# Altium footprint library Connectors.PcbLib: 304 footprints (part 10 of 19)
Each footprint in its own frame and in the unit in brackets; x right, y up, seen from the top. Pads: shape width x height; smd on the part's side, far side on the other; paste and mask are expansions set on the pad; w line width, h text height; cw(c..) or ccw(c..) is an arc to the next point about the centre after c.
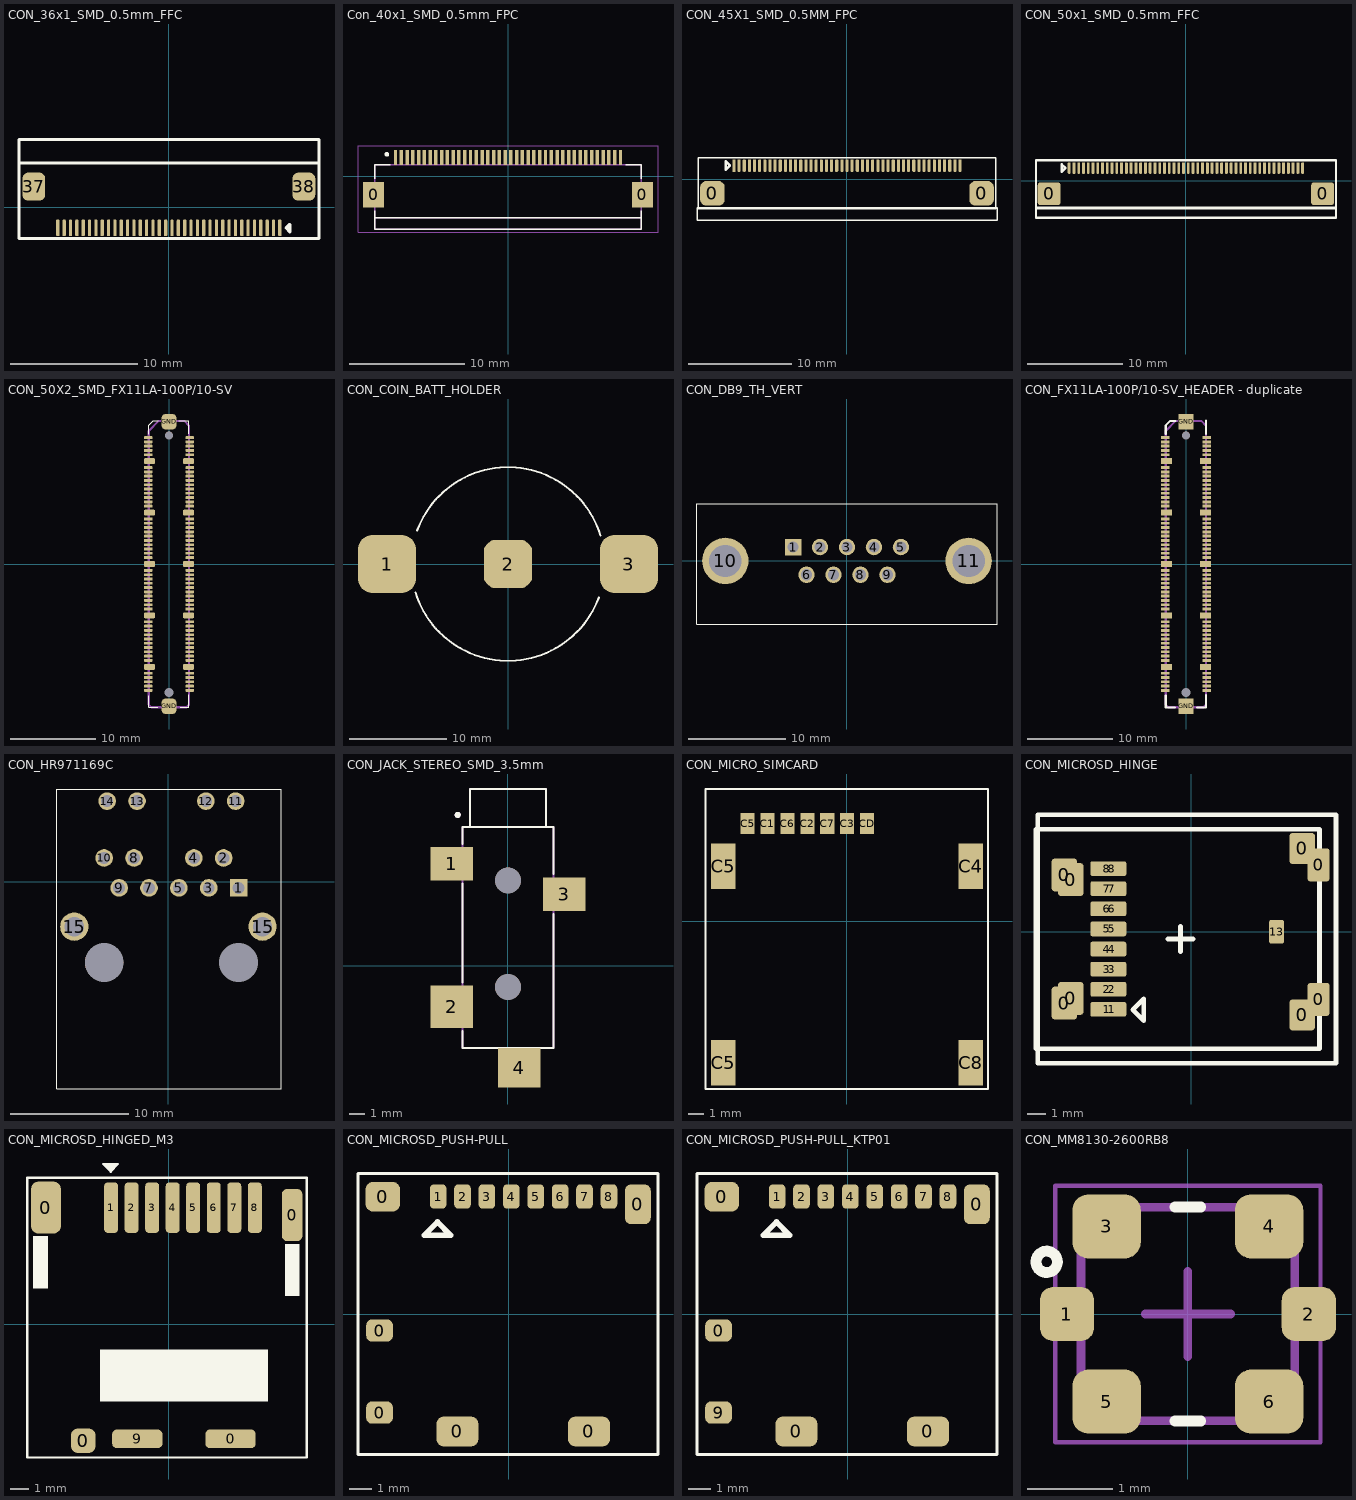
[diagram p9: the footprints below, top view; thin cyan lines are the x and y axes]

## CON_36x1_SMD_0.5mm_FFC [mil] "/ 20220629/ F-A.Ospina"
height 78.74
pads (38):
  rrect50% 10x51 smd: 1(344.49,-64) 2(324.8,-64) 3(305.12,-64) 4(285.43,-64) 5(265.75,-64) 6(246.06,-64) 7(226.38,-64) 8(206.69,-64) 9(187.01,-64) 10(167.32,-64) 11(147.64,-64) 12(127.95,-64) 13(108.27,-64) 14(88.58,-64) 15(68.9,-64) 16(49.21,-64) 17(29.53,-64) 18(9.84,-64) 19(-9.84,-64) 20(-29.53,-64) 21(-49.21,-64) 22(-68.9,-64) 23(-88.58,-64) 24(-108.27,-64) 25(-127.95,-64) 26(-147.64,-64) 27(-167.32,-64) 28(-187.01,-64) 29(-206.69,-64) 30(-226.38,-64) 31(-246.06,-64) 32(-265.75,-64) 33(-285.43,-64) 34(-305.12,-64) 35(-324.8,-64)
  rrect50% 10x50.98 smd: 36(-344.49,-64)
  rrect50% 71x87 smd: 37(-419,64) 38(419,64)
Top Overlay:
  lines w10: -464.93,137.06 -227.36,137.06 ; -230.52,137.06 234.24,137.01 466.03,137.01 ; -464.93,-96.88 465.77,-96.88 465.77,210.2 -464.93,210.2 -464.93,-96.88 ; 363.62,-64.13 375.43,-53.46 375.43,-76.45 363.62,-64.13
3D body "FH12A-36S-0.5SH.stp": height 79.53, standoff -5.42, extent -443.4,-76.47 442.46,199.12

## Con_40x1_SMD_0.5mm_FPC [mm] "/20230904/J-E.Pachon"
pads (42):
  rect 1.8x2.2 smd: 0(-11.65,-1.625) 0(11.65,-1.625)
  rect 0.3x1.3 smd: 1(-9.75,1.625) 2(-9.25,1.625) 3(-8.75,1.625) 4(-8.25,1.625) 5(-7.75,1.625) 6(-7.25,1.625) 7(-6.75,1.625) 8(-6.25,1.625) 9(-5.75,1.625) 10(-5.25,1.625) 11(-4.75,1.625) 12(-4.25,1.625) 13(-3.75,1.625) 14(-3.25,1.625) 15(-2.75,1.625) 16(-2.25,1.625) 17(-1.75,1.625) 18(-1.25,1.625) 19(-0.75,1.625) 20(-0.25,1.625) 21(0.25,1.625) 22(0.75,1.625) 23(1.25,1.625) 24(1.75,1.625) 25(2.25,1.625) 26(2.75,1.625) 27(3.25,1.625) 28(3.75,1.625) 29(4.25,1.625) 30(4.75,1.625) 31(5.25,1.625) 32(5.75,1.625) 33(6.25,1.625) 34(6.75,1.625) 35(7.25,1.625) 36(7.75,1.625) 37(8.25,1.625) 38(8.75,1.625) 39(9.25,1.625) 40(9.75,1.625)
Top Overlay:
  circle w0.2: c-10.5,1.875 r0.1
  lines w0.127: -11.55,-3.025 -11.55,-3.625 ; -11.55,-0.225 -11.55,0.975 -10.2,0.975 ; 10.2,0.975 11.55,0.975 11.55,-0.225 ; 11.55,-3.025 11.55,-3.625 ; -11.55,-3.625 -11.55,-4.625 11.55,-4.625 11.55,-3.625 ; -11.55,-3.625 11.55,-3.625
Top 3D Body (Mech13):
  lines w0.127: -11.55,-3.625 -11.55,-4.625 11.55,-4.625 11.55,-3.625 ; -11.55,-3.625 -11.55,0.975 11.55,0.975 11.55,-3.625 ; -11.55,-3.625 11.55,-3.625
Mechanical 15:
  lines w0.05: -13,-4.875 13,-4.875 13,2.625 -13,2.625 -13,-4.875
3D body "step_temp.STEP": height 2.2, standoff 0, extent -12.05,-4.625 12.05,1.775

## CON_45X1_SMD_0.5MM_FPC [mm] "/ 20200724 / N-A.Potosi"
pads (47):
  rrect50% 2.4x2.4 smd: 0(-13.1,-1.35) 0(13.1,-1.35)
  rect 0.3x1.2 smd: 1(-11,1.35)
  rrect50% 0.3x1.2 smd: 2(-10.5,1.35) 3(-10,1.35) 4(-9.5,1.35) 5(-9,1.35) 6(-8.5,1.35) 7(-8,1.35) 8(-7.5,1.35) 9(-7,1.35) 10(-6.5,1.35) 11(-6,1.35) 12(-5.5,1.35) 13(-5,1.35) 14(-4.5,1.35) 15(-4,1.35) 16(-3.5,1.35) 17(-3,1.35) 18(-2.5,1.35) 19(-2,1.35) 20(-1.5,1.35) 21(-1,1.35) 22(-0.5,1.35) 23(0,1.35) 24(0.5,1.35) 25(1,1.35) 26(1.5,1.35) 27(2,1.35) 28(2.5,1.35) 29(3,1.35) 30(3.5,1.35) 31(4,1.35) 32(4.5,1.35) 33(5,1.35) 34(5.5,1.35) 35(6,1.35) 36(6.5,1.35) 37(7,1.35) 38(7.5,1.35) 39(8,1.35) 40(8.5,1.35) 41(9,1.35) 42(9.5,1.35) 43(10,1.35) 44(10.5,1.35) 45(11,1.35)
Top Overlay:
  lines w0.127: -14.6,-3.95 -14.6,-2.75 14.6,-2.75 14.6,-3.95 -14.6,-3.95 ; -14.5,-2.84 -14.5,2.094 14.5,2.094 14.5,-2.84 -14.5,-2.84
  lines w0.254: -11.8,0.95 -11.4,1.35 -11.8,1.75 -11.8,0.95
3D body "s62684_451100alf.stp": height 2.11, standoff 0.05, extent -14,-3.97 14,1.67

## CON_50x1_SMD_0.5mm_FFC [mm] "/ 20200923 / V-A.Patino"
height 2
pads (52):
  rrect25% 2.4x2.4 smd: 0(-14.35,-1.35) 0(14.35,-1.35)
  rrect50% 0.3x1.2 smd mask+0.05: 1(-12.25,1.35) 2(-11.75,1.35) 3(-11.25,1.35) 4(-10.75,1.35) 5(-10.25,1.35) 6(-9.75,1.35) 7(-9.25,1.35) 8(-8.75,1.35) 9(-8.25,1.35) 10(-7.75,1.35) 11(-7.25,1.35) 12(-6.75,1.35) 13(-6.25,1.35) 14(-5.75,1.35) 15(-5.25,1.35) 16(-4.75,1.35) 17(-4.25,1.35) 18(-3.75,1.35) 19(-3.25,1.35) 20(-2.75,1.35) 21(-2.25,1.35) 22(-1.75,1.35) 23(-1.25,1.35) 24(-0.75,1.35) 25(-0.25,1.35) 26(0.25,1.35) 27(0.75,1.35) 28(1.25,1.35) 29(1.75,1.35) 30(2.25,1.35) 31(2.75,1.35) 32(3.25,1.35) 33(3.75,1.35) 34(4.25,1.35) 35(4.75,1.35) 36(5.25,1.35) 37(5.75,1.35) 38(6.25,1.35) 39(6.75,1.35) 40(7.25,1.35) 41(7.75,1.35) 42(8.25,1.35) 43(8.75,1.35) 44(9.25,1.35) 45(9.75,1.35) 46(10.25,1.35) 47(10.75,1.35) 48(11.25,1.35) 49(11.75,1.35) 50(12.25,1.35)
Top Overlay:
  lines w0.254: -15.73,-3.85 15.75,-3.85 15.75,-2.79 -15.73,-2.79 -15.73,-3.85 ; -15.73,-2.89 15.75,-2.89 15.75,2.15 -15.73,2.15 -15.73,-2.89 ; -13.05,0.95 -13.05,1.75 -12.65,1.35 -13.05,0.95
3D body "62684502100alf.stp": height 2, standoff -0.05, extent -15.24,-4.12 15.26,1.48

## CON_50X2_SMD_FX11LA-100P/10-SV [mm] "Hirose Conn/20200714/N-A.Potosi"
pads (114):
  rrect50% 1x0.33 smd: A1(-2.425,14.749) A2(-2.425,14.249) A3(-2.425,13.749) A4(-2.425,13.249) A5(-2.425,12.749) A6(-2.425,11.249) A7(-2.425,10.749) A8(-2.425,10.249) A9(-2.425,9.749) A10(-2.425,9.249) A11(-2.425,8.749) A12(-2.425,8.25) A13(-2.425,7.75) A14(-2.425,7.25) A15(-2.425,6.75) A16(-2.425,5.25) A17(-2.425,4.75) A18(-2.425,4.25) A19(-2.425,3.75) A20(-2.425,3.25) A21(-2.425,2.75) A22(-2.425,2.251) A23(-2.425,1.751) A24(-2.425,1.251) A25(-2.425,0.751) A26(-2.425,-0.749) A27(-2.425,-1.249) A28(-2.425,-1.749) A29(-2.425,-2.249) A30(-2.425,-2.749) A31(-2.425,-3.249) A32(-2.425,-3.748) A33(-2.425,-4.248) A34(-2.425,-4.748) A35(-2.425,-5.248) A36(-2.425,-6.747) A37(-2.425,-7.247) A38(-2.425,-7.747) A39(-2.425,-8.247) A40(-2.425,-8.747) A41(-2.425,-9.247) A42(-2.425,-9.747) A43(-2.425,-10.247) A44(-2.425,-10.747) A45(-2.425,-11.247) A46(-2.425,-12.747) A47(-2.425,-13.247) A48(-2.425,-13.747) A49(-2.425,-14.247) A50(-2.425,-14.747) B1(2.425,14.749) B2(2.425,14.249) B3(2.425,13.749) B4(2.425,13.249) B5(2.425,12.749) B6(2.425,11.249) B7(2.425,10.749) B8(2.425,10.249) B9(2.425,9.749) B10(2.425,9.249) B11(2.425,8.749) B12(2.425,8.25) B13(2.425,7.75) B14(2.425,7.25) B15(2.425,6.75) B16(2.425,5.251) B17(2.425,4.751) B18(2.425,4.251) B19(2.425,3.751) B20(2.425,3.251) B21(2.425,2.751) B22(2.425,2.251) B23(2.425,1.751) B24(2.425,1.251) B25(2.425,0.751) B26(2.425,-0.748) B27(2.425,-1.248) B28(2.425,-1.748) B29(2.425,-2.248) B30(2.425,-2.748) B31(2.425,-3.248) B32(2.425,-3.748) B33(2.425,-4.248) B34(2.425,-4.748) B35(2.425,-5.248) B36(2.425,-6.747) B37(2.425,-7.247) B38(2.425,-7.747) B39(2.425,-8.247) B40(2.425,-8.747) B41(2.425,-9.247) B42(2.425,-9.747) B43(2.425,-10.247) B44(2.425,-10.747) B45(2.425,-11.247) B46(2.425,-12.747) B47(2.425,-13.247) B48(2.425,-13.747) B49(2.425,-14.247) B50(2.425,-14.747)
  rrect50% 1.3x0.7 smd: GND(-2.275,-11.997) GND(-2.275,-5.998) GND(-2.275,0.001) GND(-2.275,6) GND(-2.275,11.999) GND(2.275,-11.996) GND(2.275,-5.998) GND(2.275,0.001) GND(2.275,6) GND(2.275,11.999)
  rrect50% 1.7x1.8 smd: GND(0,-16.601) GND(0,16.601)
  round 0.9 hole 1 unplated: ""(0,-14.997)
  round 0.9 hole 0.95 unplated: ""(0,14.999)
Top Overlay:
  lines w0.127: -2.365,-15.35 -2.365,-16.734 -1.29,-16.734 ; -2.365,15.156 -2.365,16.17 -1.835,16.7 -1.245,16.7 ; 1.13,16.709 2.322,16.709 2.322,15.17 ; 1.301,-16.734 2.322,-16.734 2.322,-15.272
Mechanical 1:
  lines w0.251: -2.366,-16.408 -2.366,15.517 -1.183,16.7 1.782,16.7 2.318,16.164 2.318,-16.444 2.04,-16.722 -2.052,-16.722 -2.366,-16.408
3D body "47879.stp": height 1.65, standoff -0.58, extent -2.495,-17.295 2.755,17.305

## CON_COIN_BATT_HOLDER [mm] "/20201001/N-A.Potosi"
pads (3):
  rrect50% 6x6 smd: 1(-12.5,0) 3(12.5,0)
  rrect50% 5x5 smd: 2(0,0)
Top Overlay:
  lines w0.203: -9.565,-2.918 ccw(c0,0) 9.391,-3.437 ; -9.391,3.437 cw(c0,0) 9.565,2.918
3D body "CR2032_closed_battery_BH.step": height 3.97, standoff 0.11, extent -11.625,-10.257 11.625,9.743

## CON_DB9_TH_VERT [mm] "/20220603/F-A.Ospina"
pads (11):
  rect 1.69x1.69 hole 1.143: 1(-5.54,1.42)
  round 1.69 hole 1.143: 2(-2.77,1.42) 3(0,1.42) 4(2.77,1.42) 5(5.54,1.42) 6(-4.155,-1.42) 7(-1.385,-1.42) 8(1.385,-1.42) 9(4.155,-1.42)
  round 4.76 hole 3.302: 10(-12.495,0) 11(12.495,0)
Top Overlay:
  lines w0.127: -15.4,2.9 -15.4,5.867 15.403,5.867 15.403,2.875 15.403,-6.497 15.4,-6.5 -15.4,-6.5 -15.4,2.933
Bottom Overlay:
  text "6" at -3.9,-3.38 h0.76
  text "7" at -1.13,-3.38 h0.76
  text "8" at 1.64,-3.38 h0.76
  text "9" at 4.41,-3.38 h0.76
  text "4" at 3.075,2.702 h0.76
  text "3" at 0.217,2.702 h0.76
  text "2" at -2.658,2.702 h0.76
  text "1" at -5.483,2.702 h0.76
  text "5" at 5.768,2.702 h0.76
3D body "sd09s24a6gv00lf.stp": height 12.26, standoff -3.19, extent -15.554,-6.296 15.446,6.254

## CON_FX11LA-100P/10-SV_HEADER - duplicate [mm]
pads (114):
  rect 1x0.33 smd: A1(-2.425,14.749) A2(-2.425,14.249) A3(-2.425,13.749) A4(-2.425,13.249) A5(-2.425,12.749) A6(-2.425,11.249) A7(-2.425,10.749) A8(-2.425,10.249) A9(-2.425,9.749) A10(-2.425,9.249) A11(-2.425,8.749) A12(-2.425,8.25) A13(-2.425,7.75) A14(-2.425,7.25) A15(-2.425,6.75) A16(-2.425,5.25) A17(-2.425,4.75) A18(-2.425,4.25) A19(-2.425,3.75) A20(-2.425,3.25) A21(-2.425,2.75) A22(-2.425,2.251) A23(-2.425,1.751) A24(-2.425,1.251) A25(-2.425,0.751) A26(-2.425,-0.749) A27(-2.425,-1.249) A28(-2.425,-1.749) A29(-2.425,-2.249) A30(-2.425,-2.749) A31(-2.425,-3.249) A32(-2.425,-3.748) A33(-2.425,-4.248) A34(-2.425,-4.748) A35(-2.425,-5.248) A36(-2.425,-6.747) A37(-2.425,-7.247) A38(-2.425,-7.747) A39(-2.425,-8.247) A40(-2.425,-8.747) A41(-2.425,-9.247) A42(-2.425,-9.747) A43(-2.425,-10.247) A44(-2.425,-10.747) A45(-2.425,-11.247) A46(-2.425,-12.747) A47(-2.425,-13.247) A48(-2.425,-13.747) A49(-2.425,-14.247) A50(-2.425,-14.747) B1(2.425,14.749) B2(2.425,14.249) B3(2.425,13.749) B4(2.425,13.249) B5(2.425,12.749) B6(2.425,11.249) B7(2.425,10.749) B8(2.425,10.249) B9(2.425,9.749) B10(2.425,9.249) B11(2.425,8.749) B12(2.425,8.25) B13(2.425,7.75) B14(2.425,7.25) B15(2.425,6.75) B16(2.425,5.251) B17(2.425,4.751) B18(2.425,4.251) B19(2.425,3.751) B20(2.425,3.251) B21(2.425,2.751) B22(2.425,2.251) B23(2.425,1.751) B24(2.425,1.251) B25(2.425,0.751) B26(2.425,-0.748) B27(2.425,-1.248) B28(2.425,-1.748) B29(2.425,-2.248) B30(2.425,-2.748) B31(2.425,-3.248) B32(2.425,-3.748) B33(2.425,-4.248) B34(2.425,-4.748) B35(2.425,-5.248) B36(2.425,-6.747) B37(2.425,-7.247) B38(2.425,-7.747) B39(2.425,-8.247) B40(2.425,-8.747) B41(2.425,-9.247) B42(2.425,-9.747) B43(2.425,-10.247) B44(2.425,-10.747) B45(2.425,-11.247) B46(2.425,-12.747) B47(2.425,-13.247) B48(2.425,-13.747) B49(2.425,-14.247) B50(2.425,-14.747)
  rect 1.3x0.7 smd: GND(-2.275,-11.997) GND(-2.275,-5.998) GND(-2.275,0.001) GND(-2.275,6) GND(-2.275,11.999) GND(2.275,-11.996) GND(2.275,-5.998) GND(2.275,0.001) GND(2.275,6) GND(2.275,11.999)
  rect 1.7x1.8 smd: GND(0,-16.601) GND(0,16.601)
  round 0.9 hole 1 unplated: ""(0,-14.997)
  round 0.9 hole 0.95 unplated: ""(0,14.999)
Top Overlay:
  lines w0.251: -2.365,-15.35 -2.365,-16.734 -1.29,-16.734 ; -2.365,15.156 -2.365,16.17 -1.835,16.7 -1.245,16.7 ; 1.301,-16.734 2.322,-16.734 2.322,-15.272 ; 2.322,15.17 2.322,16.752
Mechanical 1:
  lines w0.251: -2.366,-16.408 -2.366,15.517 -1.183,16.7 1.782,16.7 2.318,16.164 2.318,-16.444 2.04,-16.722 -2.052,-16.722 -2.366,-16.408
3D body "47879.stp": height 1.65, standoff -0.58, extent -2.495,-17.295 2.755,17.305

## CON_HR971169C [mm] "20220607 / E.Naranjo"
pads (17):
  rect 1.5x1.5 hole 1.016: 1(5.97,-0.51)
  round 1.5 hole 1.016: 2(4.7,2.03) 3(3.43,-0.51) 4(2.16,2.03) 5(0.89,-0.51) 7(-1.65,-0.51) 8(-2.92,2.03) 9(-4.19,-0.51) 10(-5.46,2.03) 11(5.72,6.86) 12(3.18,6.86) 13(-2.667,6.86) 14(-5.21,6.86)
  round 2.4 hole 1.651: 15(-8,-3.81) 15(8,-3.81)
  round 3.25 hole 3.302 unplated: ""(-5.46,-6.86) ""(5.97,-6.86)
Top Overlay:
  lines w0.1: -9.5,-17.61 -9.5,7.89 9.6,7.89 9.6,-17.61 -9.5,-17.61
3D body: height 15.21, standoff 0, extent -8.92,-17.61 8.86,7.84

## CON_JACK_STEREO_SMD_3.5mm [mm] "/ 20200727/ M-C.Calderon"
pads (6):
  rect 2.8x2.2 smd: 1(-3.7,6.7) 3(3.7,4.7)
  rect 2.8x2.8 smd: 2(-3.7,-2.7)
  rect 2.8x2.6 smd: 4(0.75,-6.7)
  round 1.7 hole 1.7 unplated: ""(0,-1.4) ""(0,5.6)
Top Overlay:
  circle w0.2: c-3.3,9.9 r0.1
  lines w0.127: -3,-4.3 -3,-5.4 3,-5.4 3,3.4 ; -3,-1.1 -3,5.4 ; -3,8 -3,9.1 -2.5,9.1 ; 3,6 3,9.1 2.5,9.1 ; -2.5,9.1 -2.5,11.6 2.5,11.6 2.5,9.1 ; -2.5,9.1 2.5,9.1
Mechanical 4:
  circle w0.2: c-3.3,9.9 r0.1
  circle w0.2: c-3.3,9.9 r0.1
  lines w0.127: -3,-5.4 -3,9.1 ; -3,-5.4 3,-5.4 ; -3,-5.4 -3,9.1 ; -3,-5.4 3,-5.4 ; -3,9.1 3,9.1 ; -3,9.1 3,9.1 ; -2.5,11.6 -2.5,9.1 -2.5,11.6 ; -2.5,11.6 2.5,11.6 ; -2.5,11.6 2.5,11.6 ; 2.5,11.6 2.5,9.1 2.5,11.6 ; 3,-5.4 3,9.1 ; 3,-5.4 3,9.1
3D body "User Library-Audio jack 4.step": height 5.11, standoff -0.69, extent -4.506,-6.7 4.506,11.9

## CON_MICRO_SIMCARD [mm] "/20210224/J-E.Pachon"
pads (11):
  rect 0.9x1.35 smd: C1(-5.07,6.235) C2(-2.53,6.235) C3(0.01,6.235) C5(-6.34,6.235) C6(-3.8,6.235) C7(-1.26,6.235) CD(1.28,6.235)
  rect 1.55x2.9 smd: C4(7.9,3.505) C5(-7.9,-9) C5(-7.9,3.505) C8(7.9,-9)
Top Overlay:
  lines w0.127: -9.02,-10.685 -9.02,8.445 8.99,8.445 8.99,-10.685 -9.02,-10.685
3D body: height 1.35, standoff 0, extent -8.72,-10.685 8.722,7.525

## CON_MICROSD_HINGE [mm] "/ 20190710  / C-A.Serna.A"
height 2
pads (25):
  rrect25% 1.4x1.8 smd: 0(-6.95,-3.9) 0(-6.95,3.1) 0(-6.6,-3.65) 0(-6.6,2.85)
  rrect25% 1.4x1.7 smd: 0(6.05,-4.55) 0(6.05,4.55)
  rrect25% 1.2x1.8 smd: 0(6.95,-3.7) 0(6.95,3.65)
  rrect25% 1.8x0.8 smd: 1(-4.625,-4.25) 2(-4.625,-3.15) 3(-4.625,-2.05) 4(-4.625,-0.95) 5(-4.625,0.15) 6(-4.625,1.25) 7(-4.625,2.35) 8(-4.625,3.45)
  rrect25% 1.6x0.8 smd: 1(-4.365,-4.25) 2(-4.365,-3.15) 3(-4.365,-2.05) 4(-4.365,-0.95) 5(-4.365,0.15) 6(-4.365,1.25) 7(-4.365,2.35) 8(-4.365,3.45)
  rrect25% 0.8x1.3 smd: 13(4.65,0)
Top Overlay:
  lines w0.254: -0.6,-0.4 -0.6,0.3 -0.6,-0.4 ; -0.6,-0.4 -0.6,-1.1 -0.6,-0.4 ; -0.6,-0.4 -1.3,-0.4 -0.6,-0.4 ; -0.6,-0.4 0.1,-0.4 -0.6,-0.4 ; -8.5,-6.4 -8.5,5.6 7,5.6 7,-6.4 -8.5,-6.4 ; -8.4,-7.2 7.9,-7.2 7.9,6.4 -8.4,6.4 -8.4,-7.2 ; -3.2,-4.275 -2.6,-3.675 -2.6,-4.875 -3.2,-4.275
3D body: height 2, standoff 0, extent -8.632,-7.375 8.082,6.512

## CON_MICROSD_HINGED_M3 [mm] "/20200714/N-A.Potosi"
pads (13):
  rrect50% 1.6x2.8 smd: 0(-6.6,6.25)
  rrect50% 1.3x1.3 smd: 0(-4.6,-6.25)
  rrect50% 2.7x1 smd: 0(3.3,-6.15) 9(-1.7,-6.15)
  rrect50% 1.1x2.8 smd: 0(6.6,5.85)
  rrect50% 0.75x2.7 smd: 1(-3.1,6.25) 2(-2,6.25) 3(-0.9,6.25) 4(0.2,6.25) 5(1.3,6.25) 6(2.4,6.25) 7(3.5,6.25) 8(4.6,6.25)
Top Overlay:
  region: 7.01,4.3 6.21,4.3 6.21,1.5 7.01,1.5
  region: 5.3,-1.35 -3.7,-1.35 -3.7,-4.15 5.3,-4.15
  region: -6.5,4.72 -7.3,4.72 -7.3,1.92 -6.5,1.92
  region: -2.758,8.589 -3.52,8.589 -3.124,8.175
  lines w0.127: -7.6,-7.15 7.38,-7.15 7.38,7.849 -7.6,7.849 -7.6,-7.15 ; -3.52,8.589 -3.124,8.175 -2.758,8.589 -3.52,8.589
3D body "DM3CS-SF.stp": height 1.98, standoff 0.05, extent -7,-6.85 6.8,7.25

## CON_MICROSD_PUSH-PULL [mm] "/20201014/J-E.Pachon"
pads (14):
  rrect50% 1.2x1 smd: 0(-5.82,-4.445) 0(-5.82,-0.745)
  rrect50% 1.55x1.35 smd: 0(-5.67,5.285)
  rrect50% 1.9x1.35 smd: 0(-2.31,-5.295) 0(3.62,-5.295)
  rrect50% 1.17x1.8 smd: 0(5.82,4.945)
  rrect50% 0.75x1.1 smd: 1(-3.18,5.295) 2(-2.08,5.295) 3(-0.98,5.295) 4(0.12,5.295) 5(1.22,5.295) 6(2.32,5.295) 7(3.42,5.295) 8(4.52,5.295)
Top Overlay:
  lines w0.127: -6.79,-6.325 -6.79,6.325 6.73,6.325 6.73,-6.325 -6.79,-6.325
  lines w0.254: -3.81,3.545 -2.61,3.545 -3.21,4.145 -3.81,3.545
3D body "1040310811.stp": height 1.34, standoff -0.11, extent -6.075,-5.825 5.875,5.575

## CON_MICROSD_PUSH-PULL_KTP01 [mm] "/20220721/F-A.Ospina"
pads (14):
  rrect50% 1.2x1 smd: 0(-5.82,-0.745) 9(-5.82,-4.445)
  rrect50% 1.55x1.35 smd: 0(-5.67,5.285)
  rrect50% 1.9x1.35 smd: 0(-2.31,-5.295) 0(3.62,-5.295)
  rrect50% 1.17x1.8 smd: 0(5.82,4.945)
  rrect50% 0.75x1.1 smd: 1(-3.18,5.295) 2(-2.08,5.295) 3(-0.98,5.295) 4(0.12,5.295) 5(1.22,5.295) 6(2.32,5.295) 7(3.42,5.295) 8(4.52,5.295)
Top Overlay:
  lines w0.127: -6.79,-6.325 6.73,-6.325 6.73,6.325 -6.79,6.325 -6.79,-6.325
  lines w0.254: -3.81,3.545 -3.21,4.145 -2.61,3.545 -3.81,3.545
3D body "1040310811.stp": height 1.34, standoff -0.11, extent -6.075,-5.825 5.875,5.575

## CON_MM8130-2600RB8 [mm] "/ 20190222 / C-A.Serna.A"
pads (6):
  rrect50% 0.635x0.635 smd: 1(-1.414,0) 2(1.414,0)
  rrect50% 0.8x0.75 smd: 3(-0.95,1.025) 4(0.95,1.025) 5(-0.95,-1.025) 6(0.95,-1.025)
Top Overlay:
  circle w0.127: c-1.651,0.61 r0.125
  lines w0.127: -0.15,-1.25 0.15,-1.25 ; -0.15,1.25 0.15,1.25
Mechanical 1:
  lines w0.1: -1.25,-1.25 -1.25,1.25 1.25,1.25 1.25,-1.25 -1.25,-1.25
Mechanical 15:
  lines w0.05: -1.55,-1.5 1.55,-1.5 1.55,1.5 -1.55,1.5 -1.55,-1.5
  lines w0.1: -0.5,0 0.5,0 ; 0,-0.5 0,0.5
3D body "MS-156C3.stp": height 1.36, standoff 0.01, extent -1.16,-1.15 1.14,1.15